# Altium footprint library MP3_RevA.PcbLib: 12 footprints
Each footprint in its own frame and in the unit in brackets; x right, y up, seen from the top. Pads: shape width x height; smd on the part's side, far side on the other; paste and mask are expansions set on the pad; w line width, h text height; cw(c..) or ccw(c..) is an arc to the next point about the centre after c.
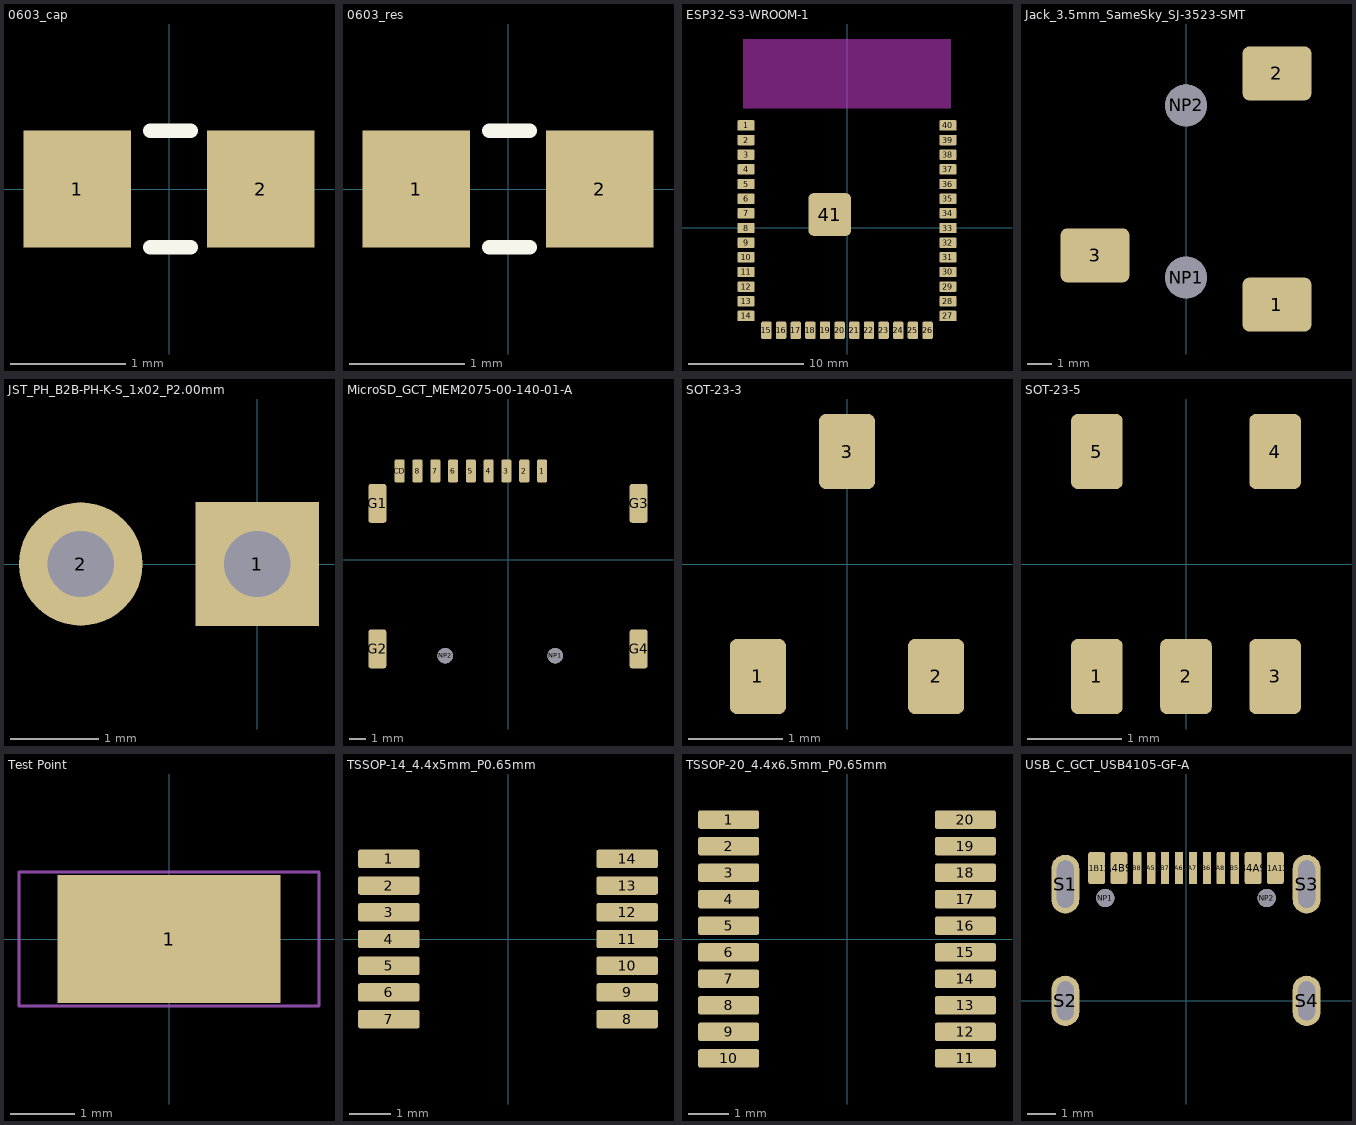
[diagram p0: the footprints below, top view; thin cyan lines are the x and y axes]

## 0603_cap [mil]
pads (2):
  rect 37x40 smd: 1(-31.5,0) 2(31.5,0)
Top Overlay:
  lines w5: -6.5,-20 7.5,-20 ; -6.5,20 7.5,20
3D body "CircuitWorks-CAPACITOR 0603.STEP": height 34.36, standoff 0.5, extent -31.5,-16.93 31.5,16.93

## 0603_res [mil] "1608 Metric / 20190225 / C-A.Serna.A"
pads (2):
  rect 37x40 smd: 1(-31.5,0) 2(31.5,0)
Top Overlay:
  lines w5: -6.5,-20 7.5,-20 ; -6.5,20 7.5,20
3D body "C0603.step": height 11.89, standoff 0, extent -31.5,-15.75 31.5,15.75

## ESP32-S3-WROOM-1 [mm] "Espressif ESP32-S3-WROOM-1 module, 18x25.5mm, 41 pads; land pattern per datasheet v1.8 Fig.11-1. Keep copper out of antenna area."
pads (41):
  rrect25% 1.5x0.9 smd: 1(-8.75,8.88) 2(-8.75,7.61) 3(-8.75,6.34) 4(-8.75,5.07) 5(-8.75,3.8) 6(-8.75,2.53) 7(-8.75,1.26) 8(-8.75,-0.01) 9(-8.75,-1.28) 10(-8.75,-2.55) 11(-8.75,-3.82) 12(-8.75,-5.09) 13(-8.75,-6.36) 14(-8.75,-7.63) 27(8.75,-7.63) 28(8.75,-6.36) 29(8.75,-5.09) 30(8.75,-3.82) 31(8.75,-2.55) 32(8.75,-1.28) 33(8.75,-0.01) 34(8.75,1.26) 35(8.75,2.53) 36(8.75,3.8) 37(8.75,5.07) 38(8.75,6.34) 39(8.75,7.61) 40(8.75,8.88)
  rrect25% 0.9x1.5 smd: 15(-6.985,-8.88) 16(-5.715,-8.88) 17(-4.445,-8.88) 18(-3.175,-8.88) 19(-1.905,-8.88) 20(-0.635,-8.88) 21(0.635,-8.88) 22(1.905,-8.88) 23(3.175,-8.88) 24(4.445,-8.88) 25(5.715,-8.88) 26(6.985,-8.88)
  rrect25% 3.7x3.7 smd: 41(-1.5,1.16)
Top Layer keep-out:
  region: -9,16.37 9,16.37 9,10.37 -9,10.37
3D body "ESP32-S3-WROOM-1-N16R8.STEP": height 3.26, standoff 0.01, extent -9,-9.13 9,16.37

## Jack_3.5mm_SameSky_SJ-3523-SMT [mm] "Same Sky SJ-3523-SMT 3.5mm stereo jack: 1=sleeve 2=tip 3=ring (datasheet 04/15/2025). Barrel faces -Y."
pads (5):
  rrect25% 2.8x2.2 smd: 1(3.7,2.4) 2(3.7,11.8) 3(-3.7,4.4)
  round 1.7 / inner round 0 / far side round 1.7 hole 1.7 unplated: NP1(0,3.5) NP2(0,10.5)
3D body "SJ-3523-SMT-TR.STEP": height 5.01, standoff -0.79, extent -4.5,-2.5 4.5,14.5

## JST_PH_B2B-PH-K-S_1x02_P2.00mm [mm] "JST PH 2-pin top entry THT, pitch 2.0, hole phi0.7+0.1 (JST PH catalog). Body 5.9x4.5."
pads (2):
  rect 1.4x1.4 on Top hole 0.75: 1(0,0)
  round 1.4 on Top hole 0.75: 2(-2,0)
3D body "B2B-PH-K-S.STEP": height 5.81, standoff -3.59, extent -3.937,-2.758 1.963,1.742

## MicroSD_GCT_MEM2075-00-140-01-A [mm] "GCT MEM2075 microSD push-push, 1.4mm profile, normally-open card detect CD to shell (G). Drawing rev A1. Card inserts from -Y edge."
pads (15):
  rrect25% 0.62x1.4 smd: 1(2.105,5.5) 2(1.005,5.5) 3(-0.095,5.5) 4(-1.195,5.5) 5(-2.295,5.5) 6(-3.395,5.5) 7(-4.495,5.5) 8(-5.595,5.5) CD(-6.695,5.5)
  rrect25% 1.1x2.4 smd: G1(-8.075,3.5) G2(-8.075,-5.5) G3(8.075,3.5) G4(8.075,-5.5)
  round 0.95 / inner round 0 / far side round 0.95 hole 0.95 unplated: NP1(2.915,-5.92) NP2(-3.885,-5.92)
3D body "MEM2075-00-140-01-A.STEP": height 1.46, standoff -0.59, extent -8.312,-10.084 8.128,5.766

## SOT-23-3 [mm] "SOT-23 (TO-236) 3 leads, pitch 0.95/1.9, rows 2.40; land derived from SOT25 pattern (verify against IPC-7351 / vendor). AO3401A: 1=G 2=S 3=D."
pads (3):
  rrect25% 0.6x0.8 smd: 1(-0.95,-1.2) 2(0.95,-1.2) 3(0,1.2)
3D body "SOT-23-3L_AOS.step": height 1.25, standoff 0, extent -1.549,-1.499 1.549,1.499

## SOT-23-5 [mm] "SOT-23-5 / SOT25, land per Diodes AP2112 datasheet DS39724 (pads 0.55 x 0.80, rows 2.40, pitch 0.95). Used by AP2112K and MCP73831."
pads (5):
  rrect25% 0.55x0.8 smd: 1(-0.95,-1.2) 2(0,-1.2) 3(0.95,-1.2) 4(0.95,1.2) 5(-0.95,1.2)
3D body "SOT-23-5_MC_MCH.step": height 1.45, standoff 0, extent -1.549,-1.6 1.549,1.6

## Test Point [mm]
pads (1):
  rect 3.5x2 smd: 1(0,0)
Mechanical 13:
  lines w0.127: -1.6,-0.8 1.6,-0.8 1.6,0.8 -1.6,0.8 -1.6,-0.8
Mechanical 15:
  lines w0.05: -2.35,-1.05 2.35,-1.05 2.35,1.05 -2.35,1.05 -2.35,-1.05
3D body "step_temp.STEP": height 2.01, standoff 0, extent -1.6,-0.8 1.6,0.8

## TSSOP-14_4.4x5mm_P0.65mm [mm] "TI PW0014A TSSOP-14, 4.4 mm body, pitch 0.65; land per SLOS704B example board layout (pads 1.5 x 0.45, rows 5.8 mm)."
pads (14):
  rrect25% 1.5x0.45 smd: 1(-2.9,1.95) 2(-2.9,1.3) 3(-2.9,0.65) 4(-2.9,0) 5(-2.9,-0.65) 6(-2.9,-1.3) 7(-2.9,-1.95) 8(2.9,-1.95) 9(2.9,-1.3) 10(2.9,-0.65) 11(2.9,0) 12(2.9,0.65) 13(2.9,1.3) 14(2.9,1.95)
3D body "PW0014A.stp": height 1.13, standoff 0, extent -3.2,-2.5 3.2,2.5

## TSSOP-20_4.4x6.5mm_P0.65mm [mm] "TI PW0020A TSSOP-20, 4.4 mm body, pitch 0.65; land per SLAS859C example board layout (pads 1.5 x 0.45, rows 5.8 mm)."
pads (20):
  rrect25% 1.5x0.45 smd: 1(-2.9,2.925) 2(-2.9,2.275) 3(-2.9,1.625) 4(-2.9,0.975) 5(-2.9,0.325) 6(-2.9,-0.325) 7(-2.9,-0.975) 8(-2.9,-1.625) 9(-2.9,-2.275) 10(-2.9,-2.925) 11(2.9,-2.925) 12(2.9,-2.275) 13(2.9,-1.625) 14(2.9,-0.975) 15(2.9,-0.325) 16(2.9,0.325) 17(2.9,0.975) 18(2.9,1.625) 19(2.9,2.275) 20(2.9,2.925)
3D body "PW0020A.stp": height 1.13, standoff 0, extent -3.2,-3.25 3.2,3.25

## USB_C_GCT_USB4105-GF-A [mm] "GCT USB4105 USB-C 2.0 receptacle, SMT+THT shell, drawing rev B4. y=-2.60 is PCB edge. Pads named by contact (A1B12 = GND etc)."
pads (18):
  rrect25% 0.6x1.15 smd: A1B12(-3.2,4.755) A4B9(-2.4,4.755) B1A12(3.2,4.755) B4A9(2.4,4.755)
  rrect25% 0.3x1.15 smd: A5(-1.25,4.755) A6(-0.25,4.755) A7(0.25,4.755) A8(1.25,4.755) B5(1.75,4.755) B6(0.75,4.755) B7(-0.75,4.755) B8(-1.75,4.755)
  round 0.65 on Top hole 0.65 unplated: NP1(-2.89,3.68) NP2(2.89,3.68)
  oval 1x2.1 on Top hole 0.6 slot 1.7 at 90 deg: S1(-4.32,4.18) S3(4.32,4.18)
  oval 1x1.8 on Top hole 0.6 slot 1.4 at 90 deg: S2(-4.32,0) S4(4.32,0)
3D body "USB4105-GF-A.STEP": height 3.31, standoff -1.1, extent -4.597,-2.794 4.343,4.916